# Altium schematic symbol library Term,Socket,2x5 Pin,2.54mm,RA,Thru.Schlib: 1 symbol
Pins are listed as number, name and electrical type; pins without a type are passive.

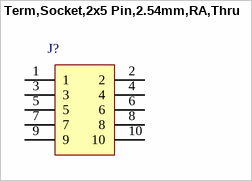
[diagram p0: symbol Term,Socket,2x5 Pin,2.54mm,RA,Thru]

## Term,Socket,2x5 Pin,2.54mm,RA,Thru
designator J?
pins: 1, 2, 3, 4, 5, 6, 7, 8, 9, 10